# EAGLE library part OPA2310IDR (library OPA2310IDR)
General Purpose Amplifier 2 Circuit Rail-to-Rail 8-SOIC Source: Datasheet <https://www.ti.com/lit/ds/symlink/opa2310.pdf?HQS=dis-mous-null-mousermode-dsf-pf-null-wwe&ts=1664810239166&ref_url=https%3A%2F%2Fwww.mouser.co.il%2F>
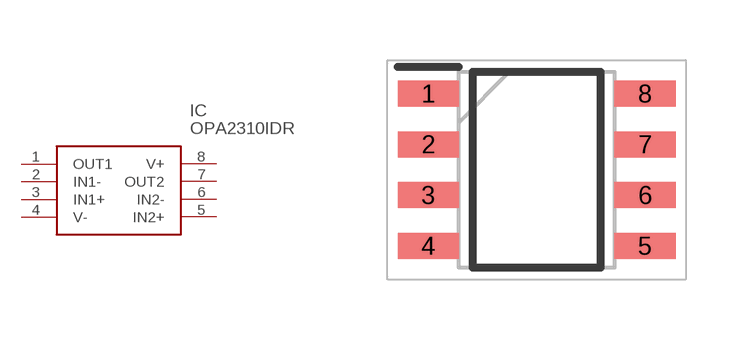
[diagram p0: symbol with the pads of SOIC127P600X175-8N; footprint SOIC127P600X175-8N]

Designator prefix IC

## OPA2310IDR (Description: General Purpose Amplifier 2 Circuit Rail-to-Rail 8-SOIC; Height: 1.75mm; Manufacturer_Name: Texas Instruments; Manufacturer_Part_Number: OPA2310IDR; Mouser_Part_Number: 595-OPA2310IDR; Mouser_Price-Stock: https://www.mouser.co.uk/ProductDetail/Texas-Instruments/OPA2310IDR?qs=vvQtp7zwQdO7M4WMfM7rQg%3D%3D)  [SOIC127P600X175-8N]
1  OUT1
2  IN1-
3  IN1+
4  V-
5  IN2+
6  IN2-
7  OUT2
8  V+

## Footprint SOIC127P600X175-8N (pad centres in mm)
(D0008A-H=1.75
smd 1.528 x 0.65: 1 -2.711,1.905; 2 -2.711,0.635; 3 -2.711,-0.635; 4 -2.711,-1.905; 5 2.711,-1.905; 6 2.711,-0.635; 7 2.711,0.635; 8 2.711,1.905